# Altium footprint library MY_LIB_Connectors_CONNFLY.PcbLib: 239 footprints (part 14 of 15)
Each footprint in its own frame and in the unit in brackets; x right, y up, seen from the top. Pads: shape width x height; smd on the part's side, far side on the other; paste and mask are expansions set on the pad; w line width, h text height; cw(c..) or ccw(c..) is an arc to the next point about the centre after c.
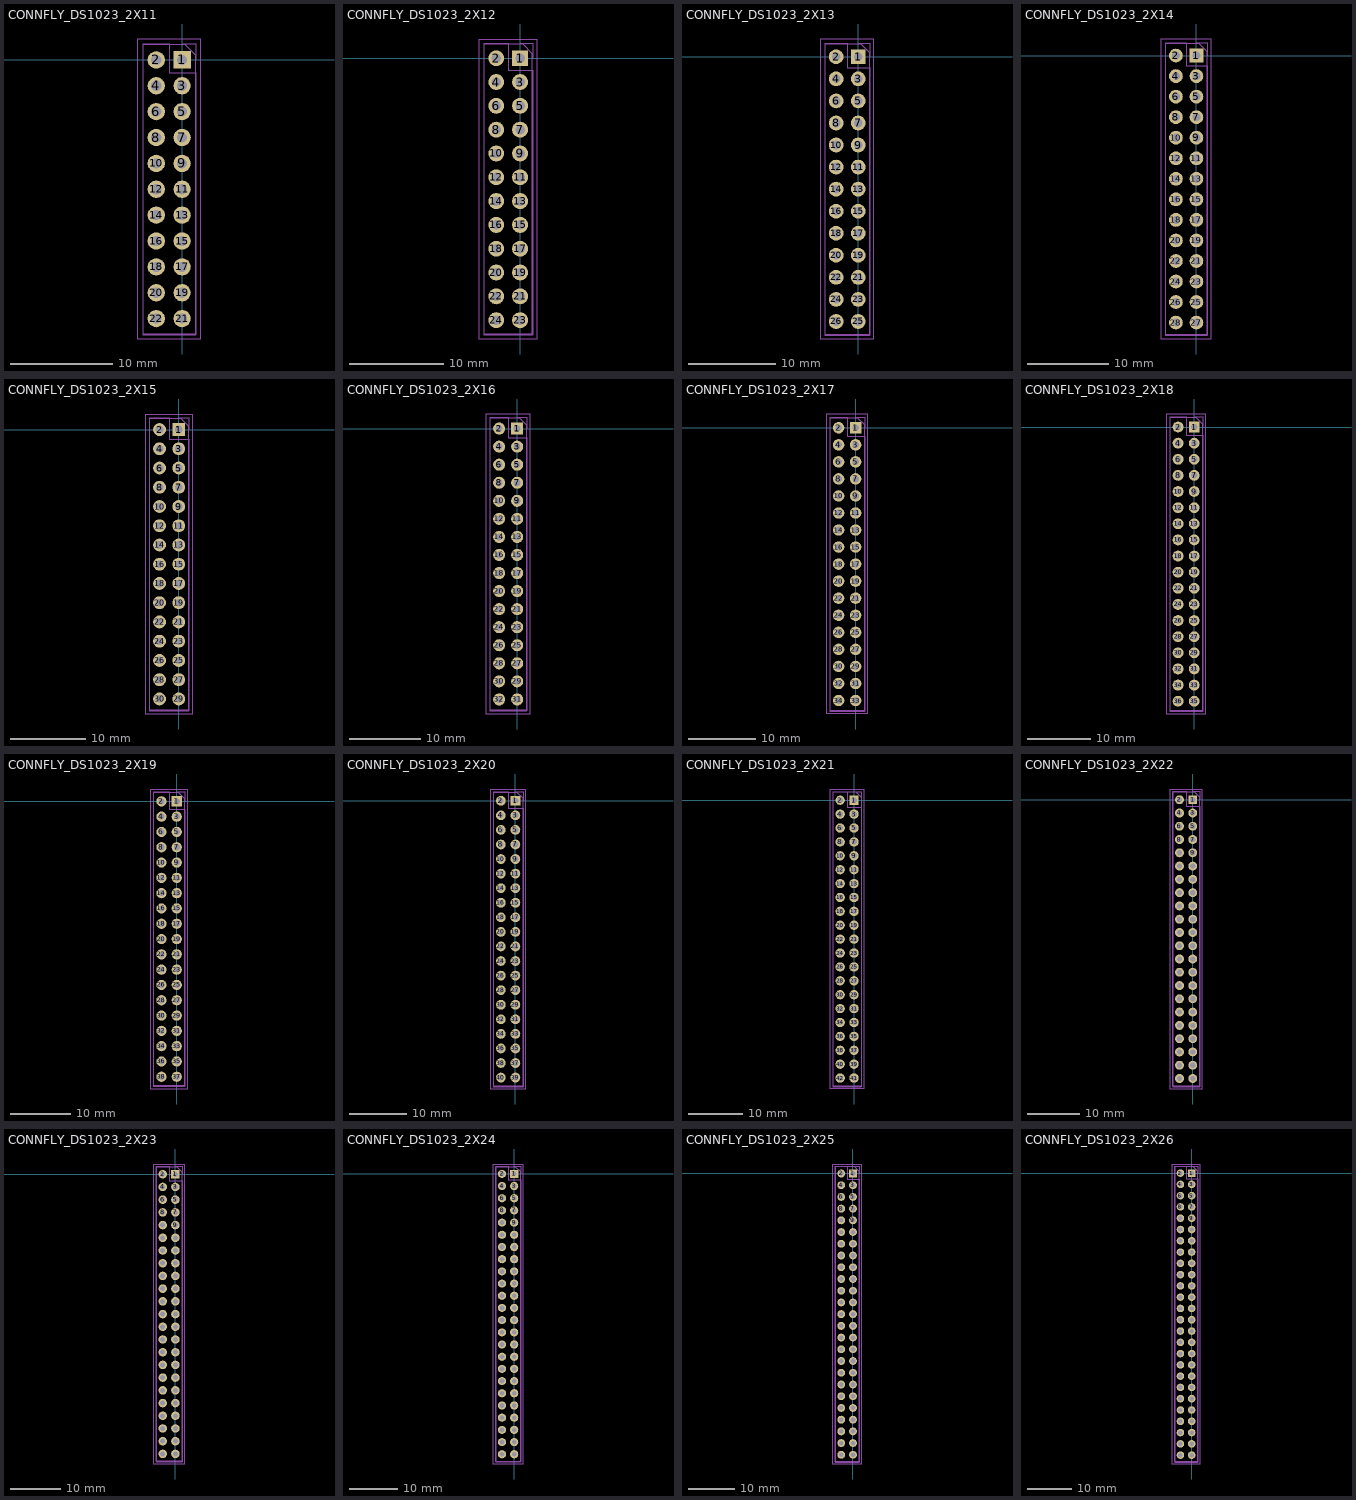
[diagram p13: the footprints below, top view; thin cyan lines are the x and y axes]

## CONNFLY_DS1023_2X11 [mm] "Connfly DS1023 2x11 standard KiCad; PTH1.0 pad1.7 pitch2.54; CC-BY-SA-4.0; STEP generic"
height 8.5
pads (22):
  rect 1.7x1.7 hole 1 paste-2539.97 mask+0.05: 1(0,0)
  round 1.7 hole 1 paste-2539.97 mask+0.05: 2(-2.54,0) 3(0,-2.54) 4(-2.54,-2.54) 5(0,-5.08) 6(-2.54,-5.08) 7(0,-7.62) 8(-2.54,-7.62) 9(0,-10.16) 10(-2.54,-10.16) 11(0,-12.7) 12(-2.54,-12.7) 13(0,-15.24) 14(-2.54,-15.24) 15(0,-17.78) 16(-2.54,-17.78) 17(0,-20.32) 18(-2.54,-20.32) 19(0,-22.86) 20(-2.54,-22.86) 21(0,-25.4) 22(-2.54,-25.4)
Mechanical 15:
  lines w0.05: -4.34,-27.4 -4.34,2.05 1.76,2.05 1.76,-27.4 -4.34,-27.4
  lines w0.1: -3.81,-26.92 -3.81,1.52 0.27,1.52 1.27,0.52 1.27,-26.92 -3.81,-26.92
  lines w0.12: 0,1.58 1.33,1.58 1.33,0 ; -3.87,-26.98 -3.87,1.58 -1.27,1.58 -1.27,-1.27 1.33,-1.27 1.33,-26.98 -3.87,-26.98
3D body "PinSocket_2x11_P2.54mm_Vertical.step": height 8.5, standoff -3.1, extent -3.81,-26.92 1.27,1.52

## CONNFLY_DS1023_2X12 [mm] "Connfly DS1023 2x12 standard KiCad; PTH1.0 pad1.7 pitch2.54; CC-BY-SA-4.0; STEP generic"
height 8.5
pads (24):
  rect 1.7x1.7 hole 1 paste-2539.97 mask+0.05: 1(0,0)
  round 1.7 hole 1 paste-2539.97 mask+0.05: 2(-2.54,0) 3(0,-2.54) 4(-2.54,-2.54) 5(0,-5.08) 6(-2.54,-5.08) 7(0,-7.62) 8(-2.54,-7.62) 9(0,-10.16) 10(-2.54,-10.16) 11(0,-12.7) 12(-2.54,-12.7) 13(0,-15.24) 14(-2.54,-15.24) 15(0,-17.78) 16(-2.54,-17.78) 17(0,-20.32) 18(-2.54,-20.32) 19(0,-22.86) 20(-2.54,-22.86) 21(0,-25.4) 22(-2.54,-25.4) 23(0,-27.94) 24(-2.54,-27.94)
Mechanical 15:
  lines w0.05: -4.34,-29.95 -4.34,2.05 1.76,2.05 1.76,-29.95 -4.34,-29.95
  lines w0.1: -3.81,-29.46 -3.81,1.52 0.27,1.52 1.27,0.52 1.27,-29.46 -3.81,-29.46
  lines w0.12: 0,1.58 1.33,1.58 1.33,0 ; -3.87,-29.52 -3.87,1.58 -1.27,1.58 -1.27,-1.27 1.33,-1.27 1.33,-29.52 -3.87,-29.52
3D body "PinSocket_2x12_P2.54mm_Vertical.step": height 8.5, standoff -3.1, extent -3.81,-29.46 1.27,1.52

## CONNFLY_DS1023_2X13 [mm] "Connfly DS1023 2x13 standard KiCad; PTH1.0 pad1.7 pitch2.54; CC-BY-SA-4.0; STEP generic"
height 8.5
pads (26):
  rect 1.7x1.7 hole 1 paste-2539.97 mask+0.05: 1(0,0)
  round 1.7 hole 1 paste-2539.97 mask+0.05: 2(-2.54,0) 3(0,-2.54) 4(-2.54,-2.54) 5(0,-5.08) 6(-2.54,-5.08) 7(0,-7.62) 8(-2.54,-7.62) 9(0,-10.16) 10(-2.54,-10.16) 11(0,-12.7) 12(-2.54,-12.7) 13(0,-15.24) 14(-2.54,-15.24) 15(0,-17.78) 16(-2.54,-17.78) 17(0,-20.32) 18(-2.54,-20.32) 19(0,-22.86) 20(-2.54,-22.86) 21(0,-25.4) 22(-2.54,-25.4) 23(0,-27.94) 24(-2.54,-27.94) 25(0,-30.48) 26(-2.54,-30.48)
Mechanical 15:
  lines w0.05: -4.34,-32.5 -4.34,2.05 1.76,2.05 1.76,-32.5 -4.34,-32.5
  lines w0.1: -3.81,-32 -3.81,1.52 0.27,1.52 1.27,0.52 1.27,-32 -3.81,-32
  lines w0.12: 0,1.58 1.33,1.58 1.33,0 ; -3.87,-32.06 -3.87,1.58 -1.27,1.58 -1.27,-1.27 1.33,-1.27 1.33,-32.06 -3.87,-32.06
3D body "PinSocket_2x13_P2.54mm_Vertical.step": height 8.5, standoff -3.1, extent -3.81,-32 1.27,1.52

## CONNFLY_DS1023_2X14 [mm] "Connfly DS1023 2x14 standard KiCad; PTH1.0 pad1.7 pitch2.54; CC-BY-SA-4.0; STEP generic"
height 8.5
pads (28):
  rect 1.7x1.7 hole 1 paste-2539.97 mask+0.05: 1(0,0)
  round 1.7 hole 1 paste-2539.97 mask+0.05: 2(-2.54,0) 3(0,-2.54) 4(-2.54,-2.54) 5(0,-5.08) 6(-2.54,-5.08) 7(0,-7.62) 8(-2.54,-7.62) 9(0,-10.16) 10(-2.54,-10.16) 11(0,-12.7) 12(-2.54,-12.7) 13(0,-15.24) 14(-2.54,-15.24) 15(0,-17.78) 16(-2.54,-17.78) 17(0,-20.32) 18(-2.54,-20.32) 19(0,-22.86) 20(-2.54,-22.86) 21(0,-25.4) 22(-2.54,-25.4) 23(0,-27.94) 24(-2.54,-27.94) 25(0,-30.48) 26(-2.54,-30.48) 27(0,-33.02) 28(-2.54,-33.02)
Mechanical 15:
  lines w0.05: -4.34,-35.05 -4.34,2.05 1.76,2.05 1.76,-35.05 -4.34,-35.05
  lines w0.1: -3.81,-34.54 -3.81,1.52 0.27,1.52 1.27,0.52 1.27,-34.54 -3.81,-34.54
  lines w0.12: 0,1.58 1.33,1.58 1.33,0 ; -3.87,-34.6 -3.87,1.58 -1.27,1.58 -1.27,-1.27 1.33,-1.27 1.33,-34.6 -3.87,-34.6
3D body "PinSocket_2x14_P2.54mm_Vertical.step": height 8.5, standoff -3.1, extent -3.81,-34.54 1.27,1.52

## CONNFLY_DS1023_2X15 [mm] "Connfly DS1023 2x15 standard KiCad; PTH1.0 pad1.7 pitch2.54; CC-BY-SA-4.0; STEP generic"
height 8.5
pads (30):
  rect 1.7x1.7 hole 1 paste-2539.97 mask+0.05: 1(0,0)
  round 1.7 hole 1 paste-2539.97 mask+0.05: 2(-2.54,0) 3(0,-2.54) 4(-2.54,-2.54) 5(0,-5.08) 6(-2.54,-5.08) 7(0,-7.62) 8(-2.54,-7.62) 9(0,-10.16) 10(-2.54,-10.16) 11(0,-12.7) 12(-2.54,-12.7) 13(0,-15.24) 14(-2.54,-15.24) 15(0,-17.78) 16(-2.54,-17.78) 17(0,-20.32) 18(-2.54,-20.32) 19(0,-22.86) 20(-2.54,-22.86) 21(0,-25.4) 22(-2.54,-25.4) 23(0,-27.94) 24(-2.54,-27.94) 25(0,-30.48) 26(-2.54,-30.48) 27(0,-33.02) 28(-2.54,-33.02) 29(0,-35.56) 30(-2.54,-35.56)
Mechanical 15:
  lines w0.05: -4.34,-37.55 -4.34,2.05 1.76,2.05 1.76,-37.55 -4.34,-37.55
  lines w0.1: -3.81,-37.08 -3.81,1.52 0.27,1.52 1.27,0.52 1.27,-37.08 -3.81,-37.08
  lines w0.12: 0,1.58 1.33,1.58 1.33,0 ; -3.87,-37.14 -3.87,1.58 -1.27,1.58 -1.27,-1.27 1.33,-1.27 1.33,-37.14 -3.87,-37.14
3D body "PinSocket_2x15_P2.54mm_Vertical.step": height 8.5, standoff -3.1, extent -3.81,-37.08 1.27,1.52

## CONNFLY_DS1023_2X16 [mm] "Connfly DS1023 2x16 standard KiCad; PTH1.0 pad1.7 pitch2.54; CC-BY-SA-4.0; STEP generic"
height 8.5
pads (32):
  rect 1.7x1.7 hole 1 paste-2539.97 mask+0.05: 1(0,0)
  round 1.7 hole 1 paste-2539.97 mask+0.05: 2(-2.54,0) 3(0,-2.54) 4(-2.54,-2.54) 5(0,-5.08) 6(-2.54,-5.08) 7(0,-7.62) 8(-2.54,-7.62) 9(0,-10.16) 10(-2.54,-10.16) 11(0,-12.7) 12(-2.54,-12.7) 13(0,-15.24) 14(-2.54,-15.24) 15(0,-17.78) 16(-2.54,-17.78) 17(0,-20.32) 18(-2.54,-20.32) 19(0,-22.86) 20(-2.54,-22.86) 21(0,-25.4) 22(-2.54,-25.4) 23(0,-27.94) 24(-2.54,-27.94) 25(0,-30.48) 26(-2.54,-30.48) 27(0,-33.02) 28(-2.54,-33.02) 29(0,-35.56) 30(-2.54,-35.56) 31(0,-38.1) 32(-2.54,-38.1)
Mechanical 15:
  lines w0.05: -4.34,-40.15 -4.34,2.05 1.76,2.05 1.76,-40.15 -4.34,-40.15
  lines w0.1: -3.81,-39.62 -3.81,1.52 0.27,1.52 1.27,0.52 1.27,-39.62 -3.81,-39.62
  lines w0.12: 0,1.58 1.33,1.58 1.33,0 ; -3.87,-39.68 -3.87,1.58 -1.27,1.58 -1.27,-1.27 1.33,-1.27 1.33,-39.68 -3.87,-39.68
3D body "PinSocket_2x16_P2.54mm_Vertical.step": height 8.5, standoff -3.1, extent -3.81,-39.62 1.27,1.52

## CONNFLY_DS1023_2X17 [mm] "Connfly DS1023 2x17 standard KiCad; PTH1.0 pad1.7 pitch2.54; CC-BY-SA-4.0; STEP generic"
height 8.5
pads (34):
  rect 1.7x1.7 hole 1 paste-2539.97 mask+0.05: 1(0,0)
  round 1.7 hole 1 paste-2539.97 mask+0.05: 2(-2.54,0) 3(0,-2.54) 4(-2.54,-2.54) 5(0,-5.08) 6(-2.54,-5.08) 7(0,-7.62) 8(-2.54,-7.62) 9(0,-10.16) 10(-2.54,-10.16) 11(0,-12.7) 12(-2.54,-12.7) 13(0,-15.24) 14(-2.54,-15.24) 15(0,-17.78) 16(-2.54,-17.78) 17(0,-20.32) 18(-2.54,-20.32) 19(0,-22.86) 20(-2.54,-22.86) 21(0,-25.4) 22(-2.54,-25.4) 23(0,-27.94) 24(-2.54,-27.94) 25(0,-30.48) 26(-2.54,-30.48) 27(0,-33.02) 28(-2.54,-33.02) 29(0,-35.56) 30(-2.54,-35.56) 31(0,-38.1) 32(-2.54,-38.1) 33(0,-40.64) 34(-2.54,-40.64)
Mechanical 15:
  lines w0.05: -4.34,-42.65 -4.34,2.05 1.76,2.05 1.76,-42.65 -4.34,-42.65
  lines w0.1: -3.81,-42.16 -3.81,1.52 0.27,1.52 1.27,0.52 1.27,-42.16 -3.81,-42.16
  lines w0.12: 0,1.58 1.33,1.58 1.33,0 ; -3.87,-42.22 -3.87,1.58 -1.27,1.58 -1.27,-1.27 1.33,-1.27 1.33,-42.22 -3.87,-42.22
3D body "PinSocket_2x17_P2.54mm_Vertical.step": height 8.5, standoff -3.1, extent -3.81,-42.16 1.27,1.52

## CONNFLY_DS1023_2X18 [mm] "Connfly DS1023 2x18 standard KiCad; PTH1.0 pad1.7 pitch2.54; CC-BY-SA-4.0; STEP generic"
height 8.5
pads (36):
  rect 1.7x1.7 hole 1 paste-2539.97 mask+0.05: 1(0,0)
  round 1.7 hole 1 paste-2539.97 mask+0.05: 2(-2.54,0) 3(0,-2.54) 4(-2.54,-2.54) 5(0,-5.08) 6(-2.54,-5.08) 7(0,-7.62) 8(-2.54,-7.62) 9(0,-10.16) 10(-2.54,-10.16) 11(0,-12.7) 12(-2.54,-12.7) 13(0,-15.24) 14(-2.54,-15.24) 15(0,-17.78) 16(-2.54,-17.78) 17(0,-20.32) 18(-2.54,-20.32) 19(0,-22.86) 20(-2.54,-22.86) 21(0,-25.4) 22(-2.54,-25.4) 23(0,-27.94) 24(-2.54,-27.94) 25(0,-30.48) 26(-2.54,-30.48) 27(0,-33.02) 28(-2.54,-33.02) 29(0,-35.56) 30(-2.54,-35.56) 31(0,-38.1) 32(-2.54,-38.1) 33(0,-40.64) 34(-2.54,-40.64) 35(0,-43.18) 36(-2.54,-43.18)
Mechanical 15:
  lines w0.05: -4.34,-45.2 -4.34,2.05 1.76,2.05 1.76,-45.2 -4.34,-45.2
  lines w0.1: -3.81,-44.7 -3.81,1.52 0.27,1.52 1.27,0.52 1.27,-44.7 -3.81,-44.7
  lines w0.12: 0,1.58 1.33,1.58 1.33,0 ; -3.87,-44.76 -3.87,1.58 -1.27,1.58 -1.27,-1.27 1.33,-1.27 1.33,-44.76 -3.87,-44.76
3D body "PinSocket_2x18_P2.54mm_Vertical.step": height 8.5, standoff -3.1, extent -3.81,-44.7 1.27,1.52

## CONNFLY_DS1023_2X19 [mm] "Connfly DS1023 2x19 standard KiCad; PTH1.0 pad1.7 pitch2.54; CC-BY-SA-4.0; STEP generic"
height 8.5
pads (38):
  rect 1.7x1.7 hole 1 paste-2539.97 mask+0.05: 1(0,0)
  round 1.7 hole 1 paste-2539.97 mask+0.05: 2(-2.54,0) 3(0,-2.54) 4(-2.54,-2.54) 5(0,-5.08) 6(-2.54,-5.08) 7(0,-7.62) 8(-2.54,-7.62) 9(0,-10.16) 10(-2.54,-10.16) 11(0,-12.7) 12(-2.54,-12.7) 13(0,-15.24) 14(-2.54,-15.24) 15(0,-17.78) 16(-2.54,-17.78) 17(0,-20.32) 18(-2.54,-20.32) 19(0,-22.86) 20(-2.54,-22.86) 21(0,-25.4) 22(-2.54,-25.4) 23(0,-27.94) 24(-2.54,-27.94) 25(0,-30.48) 26(-2.54,-30.48) 27(0,-33.02) 28(-2.54,-33.02) 29(0,-35.56) 30(-2.54,-35.56) 31(0,-38.1) 32(-2.54,-38.1) 33(0,-40.64) 34(-2.54,-40.64) 35(0,-43.18) 36(-2.54,-43.18) 37(0,-45.72) 38(-2.54,-45.72)
Mechanical 15:
  lines w0.05: -4.34,-47.75 -4.34,2.05 1.76,2.05 1.76,-47.75 -4.34,-47.75
  lines w0.1: -3.81,-47.24 -3.81,1.52 0.27,1.52 1.27,0.52 1.27,-47.24 -3.81,-47.24
  lines w0.12: 0,1.58 1.33,1.58 1.33,0 ; -3.87,-47.3 -3.87,1.58 -1.27,1.58 -1.27,-1.27 1.33,-1.27 1.33,-47.3 -3.87,-47.3
3D body "PinSocket_2x19_P2.54mm_Vertical.step": height 8.5, standoff -3.1, extent -3.81,-47.24 1.27,1.52

## CONNFLY_DS1023_2X20 [mm] "Connfly DS1023 2x20 standard KiCad; PTH1.0 pad1.7 pitch2.54; CC-BY-SA-4.0; STEP generic"
height 8.5
pads (40):
  rect 1.7x1.7 hole 1 paste-2539.97 mask+0.05: 1(0,0)
  round 1.7 hole 1 paste-2539.97 mask+0.05: 2(-2.54,0) 3(0,-2.54) 4(-2.54,-2.54) 5(0,-5.08) 6(-2.54,-5.08) 7(0,-7.62) 8(-2.54,-7.62) 9(0,-10.16) 10(-2.54,-10.16) 11(0,-12.7) 12(-2.54,-12.7) 13(0,-15.24) 14(-2.54,-15.24) 15(0,-17.78) 16(-2.54,-17.78) 17(0,-20.32) 18(-2.54,-20.32) 19(0,-22.86) 20(-2.54,-22.86) 21(0,-25.4) 22(-2.54,-25.4) 23(0,-27.94) 24(-2.54,-27.94) 25(0,-30.48) 26(-2.54,-30.48) 27(0,-33.02) 28(-2.54,-33.02) 29(0,-35.56) 30(-2.54,-35.56) 31(0,-38.1) 32(-2.54,-38.1) 33(0,-40.64) 34(-2.54,-40.64) 35(0,-43.18) 36(-2.54,-43.18) 37(0,-45.72) 38(-2.54,-45.72) 39(0,-48.26) 40(-2.54,-48.26)
Mechanical 15:
  lines w0.05: -4.34,-50.25 -4.34,2.05 1.76,2.05 1.76,-50.25 -4.34,-50.25
  lines w0.1: -3.81,-49.78 -3.81,1.52 0.27,1.52 1.27,0.52 1.27,-49.78 -3.81,-49.78
  lines w0.12: 0,1.58 1.33,1.58 1.33,0 ; -3.87,-49.84 -3.87,1.58 -1.27,1.58 -1.27,-1.27 1.33,-1.27 1.33,-49.84 -3.87,-49.84
3D body "PinSocket_2x20_P2.54mm_Vertical.step": height 8.5, standoff -3.1, extent -3.81,-49.78 1.27,1.52

## CONNFLY_DS1023_2X21 [mm] "Connfly DS1023 2x21 standard KiCad; PTH1.0 pad1.7 pitch2.54; CC-BY-SA-4.0; STEP generic"
height 8.5
pads (42):
  rect 1.7x1.7 hole 1 paste-2539.97 mask+0.05: 1(0,0)
  round 1.7 hole 1 paste-2539.97 mask+0.05: 2(-2.54,0) 3(0,-2.54) 4(-2.54,-2.54) 5(0,-5.08) 6(-2.54,-5.08) 7(0,-7.62) 8(-2.54,-7.62) 9(0,-10.16) 10(-2.54,-10.16) 11(0,-12.7) 12(-2.54,-12.7) 13(0,-15.24) 14(-2.54,-15.24) 15(0,-17.78) 16(-2.54,-17.78) 17(0,-20.32) 18(-2.54,-20.32) 19(0,-22.86) 20(-2.54,-22.86) 21(0,-25.4) 22(-2.54,-25.4) 23(0,-27.94) 24(-2.54,-27.94) 25(0,-30.48) 26(-2.54,-30.48) 27(0,-33.02) 28(-2.54,-33.02) 29(0,-35.56) 30(-2.54,-35.56) 31(0,-38.1) 32(-2.54,-38.1) 33(0,-40.64) 34(-2.54,-40.64) 35(0,-43.18) 36(-2.54,-43.18) 37(0,-45.72) 38(-2.54,-45.72) 39(0,-48.26) 40(-2.54,-48.26) 41(0,-50.8) 42(-2.54,-50.8)
Mechanical 15:
  lines w0.05: -4.34,-52.8 -4.34,2.05 1.76,2.05 1.76,-52.8 -4.34,-52.8
  lines w0.1: -3.81,-52.32 -3.81,1.52 0.27,1.52 1.27,0.52 1.27,-52.32 -3.81,-52.32
  lines w0.12: 0,1.58 1.33,1.58 1.33,0 ; -3.87,-52.38 -3.87,1.58 -1.27,1.58 -1.27,-1.27 1.33,-1.27 1.33,-52.38 -3.87,-52.38
3D body "PinSocket_2x21_P2.54mm_Vertical.step": height 8.5, standoff -3.1, extent -3.81,-52.32 1.27,1.52

## CONNFLY_DS1023_2X22 [mm] "Connfly DS1023 2x22 standard KiCad; PTH1.0 pad1.7 pitch2.54; CC-BY-SA-4.0; STEP generic"
height 8.5
pads (44):
  rect 1.7x1.7 hole 1 paste-2539.97 mask+0.05: 1(0,0)
  round 1.7 hole 1 paste-2539.97 mask+0.05: 2(-2.54,0) 3(0,-2.54) 4(-2.54,-2.54) 5(0,-5.08) 6(-2.54,-5.08) 7(0,-7.62) 8(-2.54,-7.62) 9(0,-10.16) 10(-2.54,-10.16) 11(0,-12.7) 12(-2.54,-12.7) 13(0,-15.24) 14(-2.54,-15.24) 15(0,-17.78) 16(-2.54,-17.78) 17(0,-20.32) 18(-2.54,-20.32) 19(0,-22.86) 20(-2.54,-22.86) 21(0,-25.4) 22(-2.54,-25.4) 23(0,-27.94) 24(-2.54,-27.94) 25(0,-30.48) 26(-2.54,-30.48) 27(0,-33.02) 28(-2.54,-33.02) 29(0,-35.56) 30(-2.54,-35.56) 31(0,-38.1) 32(-2.54,-38.1) 33(0,-40.64) 34(-2.54,-40.64) 35(0,-43.18) 36(-2.54,-43.18) 37(0,-45.72) 38(-2.54,-45.72) 39(0,-48.26) 40(-2.54,-48.26) 41(0,-50.8) 42(-2.54,-50.8) 43(0,-53.34) 44(-2.54,-53.34)
Mechanical 15:
  lines w0.05: -4.34,-55.35 -4.34,2.05 1.76,2.05 1.76,-55.35 -4.34,-55.35
  lines w0.1: -3.81,-54.86 -3.81,1.52 0.27,1.52 1.27,0.52 1.27,-54.86 -3.81,-54.86
  lines w0.12: 0,1.58 1.33,1.58 1.33,0 ; -3.87,-54.92 -3.87,1.58 -1.27,1.58 -1.27,-1.27 1.33,-1.27 1.33,-54.92 -3.87,-54.92
3D body "PinSocket_2x22_P2.54mm_Vertical.step": height 8.5, standoff -3.1, extent -3.81,-54.86 1.27,1.52

## CONNFLY_DS1023_2X23 [mm] "Connfly DS1023 2x23 standard KiCad; PTH1.0 pad1.7 pitch2.54; CC-BY-SA-4.0; STEP generic"
height 8.5
pads (46):
  rect 1.7x1.7 hole 1 paste-2539.97 mask+0.05: 1(0,0)
  round 1.7 hole 1 paste-2539.97 mask+0.05: 2(-2.54,0) 3(0,-2.54) 4(-2.54,-2.54) 5(0,-5.08) 6(-2.54,-5.08) 7(0,-7.62) 8(-2.54,-7.62) 9(0,-10.16) 10(-2.54,-10.16) 11(0,-12.7) 12(-2.54,-12.7) 13(0,-15.24) 14(-2.54,-15.24) 15(0,-17.78) 16(-2.54,-17.78) 17(0,-20.32) 18(-2.54,-20.32) 19(0,-22.86) 20(-2.54,-22.86) 21(0,-25.4) 22(-2.54,-25.4) 23(0,-27.94) 24(-2.54,-27.94) 25(0,-30.48) 26(-2.54,-30.48) 27(0,-33.02) 28(-2.54,-33.02) 29(0,-35.56) 30(-2.54,-35.56) 31(0,-38.1) 32(-2.54,-38.1) 33(0,-40.64) 34(-2.54,-40.64) 35(0,-43.18) 36(-2.54,-43.18) 37(0,-45.72) 38(-2.54,-45.72) 39(0,-48.26) 40(-2.54,-48.26) 41(0,-50.8) 42(-2.54,-50.8) 43(0,-53.34) 44(-2.54,-53.34) 45(0,-55.88) 46(-2.54,-55.88)
Mechanical 15:
  lines w0.05: -4.34,-57.9 -4.34,2.05 1.76,2.05 1.76,-57.9 -4.34,-57.9
  lines w0.1: -3.81,-57.4 -3.81,1.52 0.27,1.52 1.27,0.52 1.27,-57.4 -3.81,-57.4
  lines w0.12: 0,1.58 1.33,1.58 1.33,0 ; -3.87,-57.46 -3.87,1.58 -1.27,1.58 -1.27,-1.27 1.33,-1.27 1.33,-57.46 -3.87,-57.46
3D body "PinSocket_2x23_P2.54mm_Vertical.step": height 8.5, standoff -3.1, extent -3.81,-57.4 1.27,1.52

## CONNFLY_DS1023_2X24 [mm] "Connfly DS1023 2x24 standard KiCad; PTH1.0 pad1.7 pitch2.54; CC-BY-SA-4.0; STEP generic"
height 8.5
pads (48):
  rect 1.7x1.7 hole 1 paste-2539.97 mask+0.05: 1(0,0)
  round 1.7 hole 1 paste-2539.97 mask+0.05: 2(-2.54,0) 3(0,-2.54) 4(-2.54,-2.54) 5(0,-5.08) 6(-2.54,-5.08) 7(0,-7.62) 8(-2.54,-7.62) 9(0,-10.16) 10(-2.54,-10.16) 11(0,-12.7) 12(-2.54,-12.7) 13(0,-15.24) 14(-2.54,-15.24) 15(0,-17.78) 16(-2.54,-17.78) 17(0,-20.32) 18(-2.54,-20.32) 19(0,-22.86) 20(-2.54,-22.86) 21(0,-25.4) 22(-2.54,-25.4) 23(0,-27.94) 24(-2.54,-27.94) 25(0,-30.48) 26(-2.54,-30.48) 27(0,-33.02) 28(-2.54,-33.02) 29(0,-35.56) 30(-2.54,-35.56) 31(0,-38.1) 32(-2.54,-38.1) 33(0,-40.64) 34(-2.54,-40.64) 35(0,-43.18) 36(-2.54,-43.18) 37(0,-45.72) 38(-2.54,-45.72) 39(0,-48.26) 40(-2.54,-48.26) 41(0,-50.8) 42(-2.54,-50.8) 43(0,-53.34) 44(-2.54,-53.34) 45(0,-55.88) 46(-2.54,-55.88) 47(0,-58.42) 48(-2.54,-58.42)
Mechanical 15:
  lines w0.05: -4.34,-60.45 -4.34,2.05 1.76,2.05 1.76,-60.45 -4.34,-60.45
  lines w0.1: -3.81,-59.94 -3.81,1.52 0.27,1.52 1.27,0.52 1.27,-59.94 -3.81,-59.94
  lines w0.12: 0,1.58 1.33,1.58 1.33,0 ; -3.87,-60 -3.87,1.58 -1.27,1.58 -1.27,-1.27 1.33,-1.27 1.33,-60 -3.87,-60
3D body "PinSocket_2x24_P2.54mm_Vertical.step": height 8.5, standoff -3.1, extent -3.81,-59.94 1.27,1.52

## CONNFLY_DS1023_2X25 [mm] "Connfly DS1023 2x25 standard KiCad; PTH1.0 pad1.7 pitch2.54; CC-BY-SA-4.0; STEP generic"
height 8.5
pads (50):
  rect 1.7x1.7 hole 1 paste-2539.97 mask+0.05: 1(0,0)
  round 1.7 hole 1 paste-2539.97 mask+0.05: 2(-2.54,0) 3(0,-2.54) 4(-2.54,-2.54) 5(0,-5.08) 6(-2.54,-5.08) 7(0,-7.62) 8(-2.54,-7.62) 9(0,-10.16) 10(-2.54,-10.16) 11(0,-12.7) 12(-2.54,-12.7) 13(0,-15.24) 14(-2.54,-15.24) 15(0,-17.78) 16(-2.54,-17.78) 17(0,-20.32) 18(-2.54,-20.32) 19(0,-22.86) 20(-2.54,-22.86) 21(0,-25.4) 22(-2.54,-25.4) 23(0,-27.94) 24(-2.54,-27.94) 25(0,-30.48) 26(-2.54,-30.48) 27(0,-33.02) 28(-2.54,-33.02) 29(0,-35.56) 30(-2.54,-35.56) 31(0,-38.1) 32(-2.54,-38.1) 33(0,-40.64) 34(-2.54,-40.64) 35(0,-43.18) 36(-2.54,-43.18) 37(0,-45.72) 38(-2.54,-45.72) 39(0,-48.26) 40(-2.54,-48.26) 41(0,-50.8) 42(-2.54,-50.8) 43(0,-53.34) 44(-2.54,-53.34) 45(0,-55.88) 46(-2.54,-55.88) 47(0,-58.42) 48(-2.54,-58.42) 49(0,-60.96) 50(-2.54,-60.96)
Mechanical 15:
  lines w0.05: -4.34,-62.95 -4.34,2.05 1.76,2.05 1.76,-62.95 -4.34,-62.95
  lines w0.1: -3.81,-62.48 -3.81,1.52 0.27,1.52 1.27,0.52 1.27,-62.48 -3.81,-62.48
  lines w0.12: 0,1.58 1.33,1.58 1.33,0 ; -3.87,-62.54 -3.87,1.58 -1.27,1.58 -1.27,-1.27 1.33,-1.27 1.33,-62.54 -3.87,-62.54
3D body "PinSocket_2x25_P2.54mm_Vertical.step": height 8.5, standoff -3.1, extent -3.81,-62.48 1.27,1.52

## CONNFLY_DS1023_2X26 [mm] "Connfly DS1023 2x26 standard KiCad; PTH1.0 pad1.7 pitch2.54; CC-BY-SA-4.0; STEP generic"
height 8.5
pads (52):
  rect 1.7x1.7 hole 1 paste-2539.97 mask+0.05: 1(0,0)
  round 1.7 hole 1 paste-2539.97 mask+0.05: 2(-2.54,0) 3(0,-2.54) 4(-2.54,-2.54) 5(0,-5.08) 6(-2.54,-5.08) 7(0,-7.62) 8(-2.54,-7.62) 9(0,-10.16) 10(-2.54,-10.16) 11(0,-12.7) 12(-2.54,-12.7) 13(0,-15.24) 14(-2.54,-15.24) 15(0,-17.78) 16(-2.54,-17.78) 17(0,-20.32) 18(-2.54,-20.32) 19(0,-22.86) 20(-2.54,-22.86) 21(0,-25.4) 22(-2.54,-25.4) 23(0,-27.94) 24(-2.54,-27.94) 25(0,-30.48) 26(-2.54,-30.48) 27(0,-33.02) 28(-2.54,-33.02) 29(0,-35.56) 30(-2.54,-35.56) 31(0,-38.1) 32(-2.54,-38.1) 33(0,-40.64) 34(-2.54,-40.64) 35(0,-43.18) 36(-2.54,-43.18) 37(0,-45.72) 38(-2.54,-45.72) 39(0,-48.26) 40(-2.54,-48.26) 41(0,-50.8) 42(-2.54,-50.8) 43(0,-53.34) 44(-2.54,-53.34) 45(0,-55.88) 46(-2.54,-55.88) 47(0,-58.42) 48(-2.54,-58.42) 49(0,-60.96) 50(-2.54,-60.96) 51(0,-63.5) 52(-2.54,-63.5)
Mechanical 15:
  lines w0.05: -4.34,-65.5 -4.34,2.05 1.76,2.05 1.76,-65.5 -4.34,-65.5
  lines w0.1: -3.81,-65.02 -3.81,1.52 0.27,1.52 1.27,0.52 1.27,-65.02 -3.81,-65.02
  lines w0.12: 0,1.58 1.33,1.58 1.33,0 ; -3.87,-65.08 -3.87,1.58 -1.27,1.58 -1.27,-1.27 1.33,-1.27 1.33,-65.08 -3.87,-65.08
3D body "PinSocket_2x26_P2.54mm_Vertical.step": height 8.5, standoff -3.1, extent -3.81,-65.02 1.27,1.52